# Altium footprint library F101S3_KSDIY_V2.PcbLib: 29 footprints (part 2 of 2)
Each footprint in its own frame and in the unit in brackets; x right, y up, seen from the top. Pads: shape width x height; smd on the part's side, far side on the other; paste and mask are expansions set on the pad; w line width, h text height; cw(c..) or ccw(c..) is an arc to the next point about the centre after c.
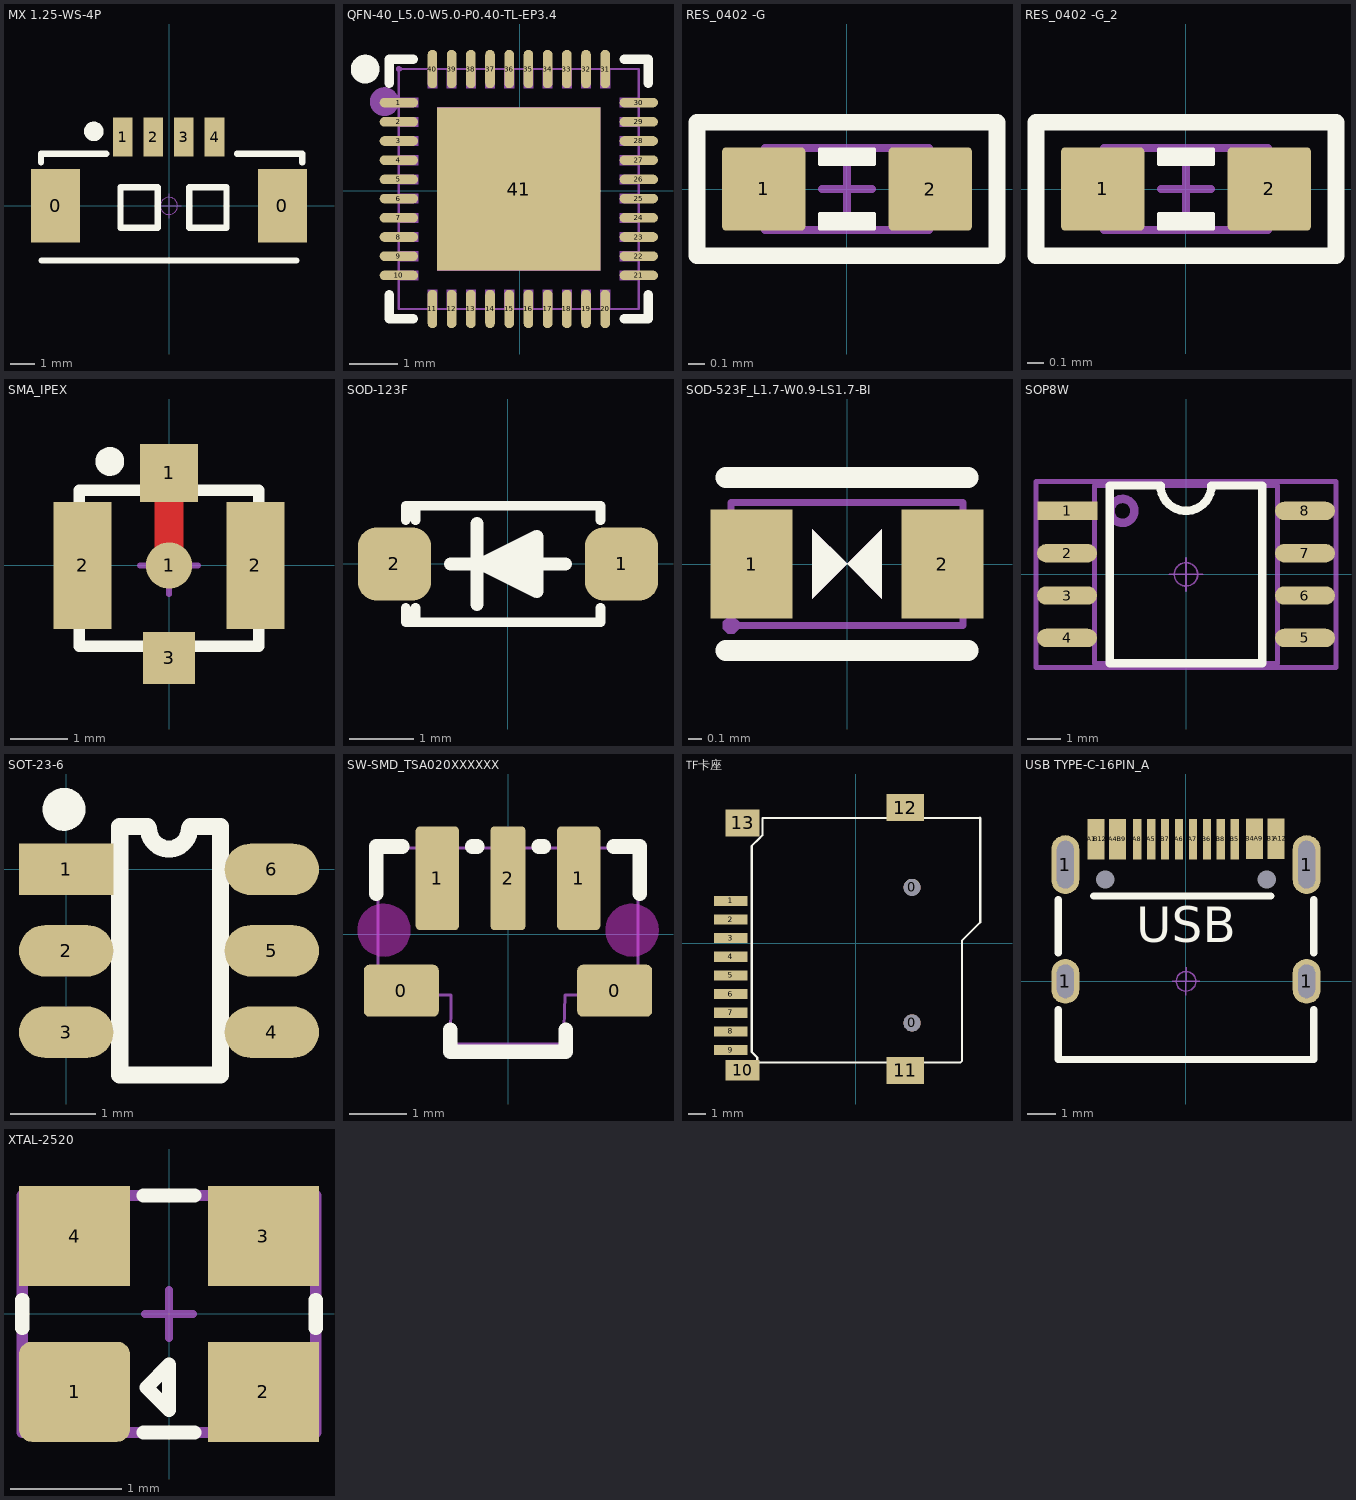
[diagram p1: the footprints below, top view; thin cyan lines are the x and y axes]

## MX 1.25-WS-4P [mm] "长：10.15mm，宽：4.2mm，高：3.4mm"
pads (6):
  rect 2x3 smd: 0(-4.632,0) 0(4.632,0)
  rect 0.8x1.6 smd: 1(-1.889,2.811) 2(-0.639,2.811) 3(0.611,2.811) 4(1.861,2.811)
Top Overlay:
  circle w0.4: c-3.074,3.048 r0.2
  lines w0.254: -5.233,1.778 -5.233,2.134 -2.566,2.134 ; -5.206,-2.228 5.201,-2.228 ; 2.782,2.134 5.449,2.134 5.449,1.778 ; -1.982,-0.889 -1.982,0.762 -0.458,0.762 -0.458,-0.889 -1.982,-0.889 ; 0.826,-0.889 0.826,0.762 2.35,0.762 2.35,-0.889 0.826,-0.889
Mechanical 15:
  circle w0.05: c0,0 r0.35
  lines w0.05: -0.5,0 0.5,0 ; 0,-0.5 0,0.5
3D body "MOLEX1.25-WS-4P.STEP": height 3.4, standoff 0, extent -5.075,-2.1 5.075,3.09

## QFN-40_L5.0-W5.0-P0.40-TL-EP3.4 [mm]
pads (41):
  oval 0.8x0.2 smd paste-100 mask+0.05: 1(-2.521,1.842) 2(-2.521,1.442) 3(-2.521,1.041) 4(-2.521,0.641) 5(-2.521,0.241) 6(-2.521,-0.158) 7(-2.521,-0.558) 8(-2.521,-0.959) 9(-2.521,-1.359) 10(-2.521,-1.759) 21(2.477,-1.759) 22(2.477,-1.359) 23(2.477,-0.959) 24(2.477,-0.558) 25(2.477,-0.158) 26(2.477,0.241) 27(2.477,0.641) 28(2.477,1.041) 29(2.477,1.442) 30(2.477,1.842)
  oval 0.2x0.8 smd paste-100 mask+0.05: 11(-1.822,-2.458) 12(-1.422,-2.458) 13(-1.022,-2.458) 14(-0.622,-2.458) 15(-0.222,-2.458) 16(0.178,-2.458) 17(0.578,-2.458) 18(0.978,-2.458) 19(1.378,-2.458) 20(1.778,-2.458) 31(1.778,2.541) 32(1.378,2.541) 33(0.978,2.541) 34(0.578,2.541) 35(0.178,2.541) 36(-0.222,2.541) 37(-0.622,2.541) 38(-1.022,2.541) 39(-1.422,2.541) 40(-1.822,2.541)
  rect 3.4x3.4 smd paste-100 mask+0.05: 41(-0.022,0.041)
Top Overlay:
  lines w0.2: -2.722,-2.159 -2.722,-2.659 -2.222,-2.659 ; -2.722,2.241 -2.722,2.741 -2.222,2.741 ; 2.178,-2.659 2.678,-2.659 2.678,-2.159 ; 2.178,2.741 2.678,2.741 2.678,2.241
  lines w0.3: -3.073,2.538 cw(c-3.223,2.539) -3.073,2.541
Top Paste:
  drawing of 41 lines, arcs and shapes, not listed
Bottom Assembly:
  circle w0.3: c-2.824,1.861 r0.15
Mechanical 15:
  drawing of 46 lines, arcs and shapes, not listed
3D body "axp2101.step": height 0.85, standoff 0, extent -2.525,-2.449 2.475,2.551

## RES_0402 -G [mil]
height 13.78
pads (2):
  rrect10% 20x20 smd mask+2: 1(-20,0) 2(20,0)
Top Overlay:
  region: -6.5,9.5 6.5,9.5 6.5,6 -6.5,6
  region: 6.5,-9.5 -6.5,-9.5 -6.5,-6 6.5,-6
  lines w1: -6.5,-9.5 -6.5,-6 6.5,-6 6.5,-9.5 -6.5,-9.5 ; -6.5,6 6.5,6 6.5,9.5 -6.5,9.5 -6.5,6
  lines w4: -36,-16 -36,16 36,16 36,-16 -36,-16
Mechanical 13:
  lines w2: -6,0 6,0 ; 0,-6 0,6 ; -19.68,-9.84 19.69,-9.84 19.68,9.84 -19.68,9.84 -19.68,-9.84
3D body "RESC1005X03L.step": height 13.78, standoff 0, extent -19.68,-9.84 19.69,9.85

## RES_0402 -G_2 [mil]
pads (2):
  rrect10% 20x20 smd mask+2: 1(-20,0) 2(20,0)
Top Overlay:
  region: 6.5,-9.5 -6.5,-9.5 -6.5,-6 6.5,-6
  region: -6.5,9.5 6.5,9.5 6.5,6 -6.5,6
  lines w1: -6.5,-9.5 6.5,-9.5 6.5,-6 -6.5,-6 -6.5,-9.5 ; -6.5,6 -6.5,9.5 6.5,9.5 6.5,6 -6.5,6
  lines w4: -36,-16 36,-16 36,16 -36,16 -36,-16
Mechanical 13:
  lines w2: -6,0 6,0 ; 0,-6 0,6 ; -19.68,-9.84 -19.68,9.84 19.69,9.84 19.68,-9.84 -19.68,-9.84
3D body "RESC1005X03L.step": height 13.78, standoff 0, extent -19.68,-9.84 19.69,9.85

## SMA_IPEX [mm] "小型贴片IPEX天线座"
pads (5):
  round 0.8 smd: 1(0,0)
  rect 1x1 smd: 1(0,1.6)
  rect 1x2.2 smd: 2(-1.496,0) 2(1.496,0)
  rect 0.9x0.9 smd: 3(0,-1.6)
Top Layer:
  lines w0.5: 0,0 0,1.6
Top Overlay:
  circle w0.25: c-1.025,1.8 r0.125
  lines w0.2: -1.55,-1.4 -1.55,1.3 1.55,1.3 1.55,-1.4 -1.55,-1.4
Mechanical 15:
  lines w0.1: -0.5,0 0.5,0 ; 0,-0.5 0,0.5

## SOD-123F [mil] "二极管"
height 1771.65
pads (2):
  rrect50% 45x45 smd: 1(70,0) 2(-70,0)
Top Overlay:
  region: 16.6,-20.7 -15,-5 -15,0 18,0 18.3,-18.4
  region: 16.6,20.7 -15,5 -15,0 18,0 18.3,18.4
  lines w6: -63,-27 -63,-36 57,-36 57,-27 ; -63,27 -63,36 57,36 57,27 ; -57,-36 -57,-27 ; -57,27 -57,36
  lines w8: -35.5,0 35.5,0 ; -19.08,25 -19.05,-25 ; 18,-17 18,17
3D body "SOD123F.STEP": height 47.24, standoff -0.39, extent -73.82,-33.46 73.82,33.46

## SOD-523F_L1.7-W0.9-LS1.7-BI [mm]
pads (2):
  rect 0.6x0.8 smd paste+0 mask+0.05: 1(-0.7,0) 2(0.7,0)
Top Overlay:
  region: -0.254,-0.254 -0.254,0.254 0,0
  region: 0.254,0.254 0.254,-0.254 0,0
  lines w0.152: -0.889,-0.635 0.889,-0.635 ; -0.889,0.635 0.889,0.635
Bottom Assembly:
  region: -0.254,-0.254 -0.254,0.254 0,0
  region: 0.254,0.254 0.254,-0.254 0,0
Mechanical 15:
  region: 0.5,0.35 0.85,0.35 0.85,-0.35 0.5,-0.35
  region: -0.85,0.35 -0.5,0.35 -0.5,-0.35 -0.85,-0.35
  region: -0.79,-0.45 -0.79,-0.425 -0.825,-0.39 -0.875,-0.39 -0.91,-0.425 -0.91,-0.45 -0.91,-0.475 -0.875,-0.51 -0.825,-0.51 -0.79,-0.475
  lines w0.051: -0.85,-0.45 0.85,-0.45 0.85,0.45 -0.85,0.45 -0.85,-0.45
3D body "h5vnd5ub.step": height 0.77, standoff 0, extent -0.85,-0.451 0.85,0.45

## SOP8W [mm] "5.3*8.3*1.8mm（长宽高）"
height 1.9
pads (8):
  rect 1.8x0.55 smd: 1(-3.556,1.905)
  oval 1.8x0.55 smd: 2(-3.569,0.635) 3(-3.569,-0.635) 4(-3.569,-1.905) 5(3.569,-1.905) 6(3.569,-0.635) 7(3.569,0.635) 8(3.569,1.905)
Top Overlay:
  lines w0.254: -2.286,-2.667 2.286,-2.667 2.286,2.667 0.762,2.667 cw(c0,2.667) -0.762,2.667 -2.286,2.667 -2.286,-2.667
Mechanical 13:
  circle w0.254: c-1.905,1.905 r0.359
  lines w0.15: -2.75,-2.667 2.75,-2.667 2.75,2.667 -2.75,2.667 -2.75,-2.667
Mechanical 15:
  circle w0.05: c0,0 r0.35
  lines w0.05: -0.5,0 0.5,0 ; 0,-0.5 0,0.5
  lines w0.15: -4.5,-2.798 -4.5,2.794 4.5,2.794 4.5,-2.798 -4.5,-2.798
3D body "SOP8W.STEP": height 1.9, standoff 0, extent -3.943,-2.64 3.943,2.64

## SOT-23-6 [mm]
pads (6):
  rect 1.1x0.6 smd: 1(0,0)
  oval 1.1x0.6 smd: 2(0,-0.95) 3(0,-1.9) 4(2.4,-1.9) 5(2.4,-0.95) 6(2.4,0)
Top Overlay:
  circle w0.25: c-0.025,0.7 r0.125
  lines w0.2: 0.95,0.5 0.625,0.5 0.625,-2.4 1.8,-2.4 1.8,0.5 1.45,0.5 ; 0.963,0.475 ccw(c1.2,0.475) 1.437,0.475
3D body "User Library-SOT23-6-1.STEP": height 1.09, standoff 0, extent -0.072,-2.344 2.354,0.45

## SW-SMD_TSA020XXXXXX [mm]
pads (5):
  rrect20% 1.3x0.9 smd mask+0.051: 0(-1.85,-0.975) 0(1.85,-0.975)
  rrect20% 0.75x1.8 smd mask+0.051: 1(-1.225,0.975) 1(1.225,0.975)
  rrect20% 0.6x1.8 smd mask+0.051: 2(0,0.975)
Top Overlay:
  lines w0.254: -2.286,0.703 -2.286,1.524 -1.831,1.524 ; -1,-1.656 -1,-2.032 1,-2.032 1,-1.656 ; -0.619,1.524 -0.531,1.524 ; 0.531,1.524 0.619,1.524 ; 1.831,1.524 2.286,1.524 2.286,0.703
Keep-Out Layer:
  board cut-out: -2.15,-0.375 -2.24,-0.375 -2.405,-0.307 -2.532,-0.18 -2.6,-0.015 -2.6,0.075 -2.6,0.164 -2.532,0.33 -2.405,0.456 -2.24,0.525 -2.15,0.525 -2.061,0.525 -1.895,0.456 -1.769,0.33 -1.7,0.164 -1.7,0.075 -1.7,-0.015 -1.769,-0.18 -1.895,-0.307 -2.061,-0.375
  board cut-out: 1.7,0.075 1.7,-0.015 1.768,-0.18 1.895,-0.307 2.06,-0.375 2.15,-0.375 2.239,-0.375 2.405,-0.307 2.531,-0.18 2.6,-0.015 2.6,0.075 2.6,0.164 2.531,0.33 2.405,0.456 2.239,0.525 2.15,0.525 2.06,0.525 1.895,0.456 1.768,0.33 1.7,0.164
Keep-Out Layer:
  circle w0.025: c2.15,0.075 r0.45
  circle w0.025: c-2.15,0.075 r0.45
Mechanical 15:
  lines w0.051: -2.25,-1.05 -0.99,-1.05 -1,-1.902 0.965,-1.902 0.99,-1.05 2.25,-1.05 2.25,1.498 -2.25,1.498 -2.25,-1.05
3D body "TSA020B3410A02.step": height 3.4, standoff -0.5, extent -2.268,-1.969 2.232,1.582

## TF卡座 [mm]
pads (15):
  round 1 hole 1 unplated: 0(3.334,-4.696) 0(3.334,3.305)
  rect 2x0.6 smd: 1(-7.366,2.505) 2(-7.366,1.405) 3(-7.366,0.305) 4(-7.366,-0.795) 5(-7.366,-1.895) 6(-7.366,-2.995) 7(-7.366,-4.095) 8(-7.366,-5.195) 9(-7.366,-6.295)
  rect 2x1.2 smd: 10(-6.666,-7.495)
  rect 2.2x1.6 smd: 11(2.934,-7.495) 12(2.934,8.005)
  rect 2x1.6 smd: 13(-6.666,7.105)
Top Overlay:
  lines w0.127: 7.334,7.405 -5.499,7.389 -5.499,6.373 -5.702,6.17 -6.125,5.747 -6.125,-6.412 -5.905,-6.632 -5.804,-6.733 -5.804,-7.038 6.185,-7.038 6.287,-6.936 6.287,0.176 7.354,1.242 7.354,7.385
3D body "User Library-micro-sd-card.STEP": height 2.2, standoff -0.5, extent -7.816,-7.795 9.384,8.305

## USB TYPE-C-16PIN_A [mm]
pads (22):
  round 0 hole 0.65: 0(-2.89,3.65) 0(2.89,3.65)
  oval 1x1.6 hole 0.6 slot 1.2 at 90 deg: 1(-4.32,0) 1(4.32,0)
  oval 1x2.1 hole 0.6 slot 1.7 at 90 deg: 1(-4.32,4.18) 1(4.32,4.18)
  rect 0.3x1.45 smd: A1(-3.375,5.092) A4(-2.6,5.092) A5(-1.25,5.092) A6(-0.25,5.092) A7(0.25,5.092) A8(-1.75,5.092) A9(2.6,5.1) A12(3.375,5.1) B1(3.075,5.1) B4(2.3,5.1) B5(1.75,5.092) B6(0.75,5.092) B7(-0.75,5.092) B8(1.25,5.092) B9(-2.3,5.092) B12(-3.075,5.092)
Top Overlay:
  lines w0.254: -4.572,-1.016 -4.572,-2.794 4.572,-2.794 4.572,-1.016 ; -4.572,1.016 -4.572,2.921 ; -3.302,3.048 3.048,3.048 ; 4.572,1.016 4.572,2.921
  text "USB" at -1.778,1.397 h1.27
Mechanical 15:
  circle w0.05: c0,0 r0.35
  lines w0.05: -0.5,0 0.5,0 ; 0,-0.5 0,0.5
3D body "USB Type-C_A.STEP": height 3.25, standoff -0.85, extent -4.47,-2.6 4.47,5.3

## XTAL-2520 [mm]
height 8.78
pads (4):
  rrect25% 1x0.9 smd mask+0.051: 1(-0.85,-0.7)
  rect 1x0.9 smd mask+0.051: 2(0.85,-0.7) 3(0.85,0.7) 4(-0.85,0.7)
Top Overlay:
  lines w0.127: -1.321,-0.127 -1.321,0.127 ; -0.229,-1.067 0.229,-1.067 ; -0.229,1.067 0.229,1.067 ; 1.321,-0.127 1.321,0.127 ; -0.203,-0.66 0,-0.457 0,-0.864 -0.203,-0.66
Mechanical 15:
  lines w0.076: -0.216,0 0.216,0 ; 0,-0.216 0,0.216
  lines w0.1: -1.321,-1.067 -1.321,1.067 1.321,1.067 1.321,-1.067 -1.321,-1.067
3D body "fa-20h.stp": height 0.55, standoff 0, extent -1.255,-1 1.245,1